# Altium schematic symbol library Diodo_SMD.SchLib: 2 symbols
Pins are listed as number, name and electrical type; pins without a type are passive.

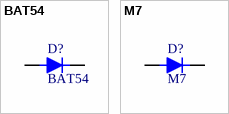
[diagram p0: symbols BAT54 to M7]

## BAT54
designator D?
Diode Schottky 30V 200mA Surface Mount SOT-23-3 (TO-236)
footprint BAT54 (SOT23-3)
pins: A, K

## M7
designator D?
1A Rectifier Diodes
footprint DO-214AC SMA
pins: A, K